# Altium footprint library 2.11-TQFP封装.PcbLib: 71 footprints (part 5 of 5)
Each footprint in its own frame and in the unit in brackets; x right, y up, seen from the top. Pads: shape width x height; smd on the part's side, far side on the other; paste and mask are expansions set on the pad; w line width, h text height; cw(c..) or ccw(c..) is an arc to the next point about the centre after c.
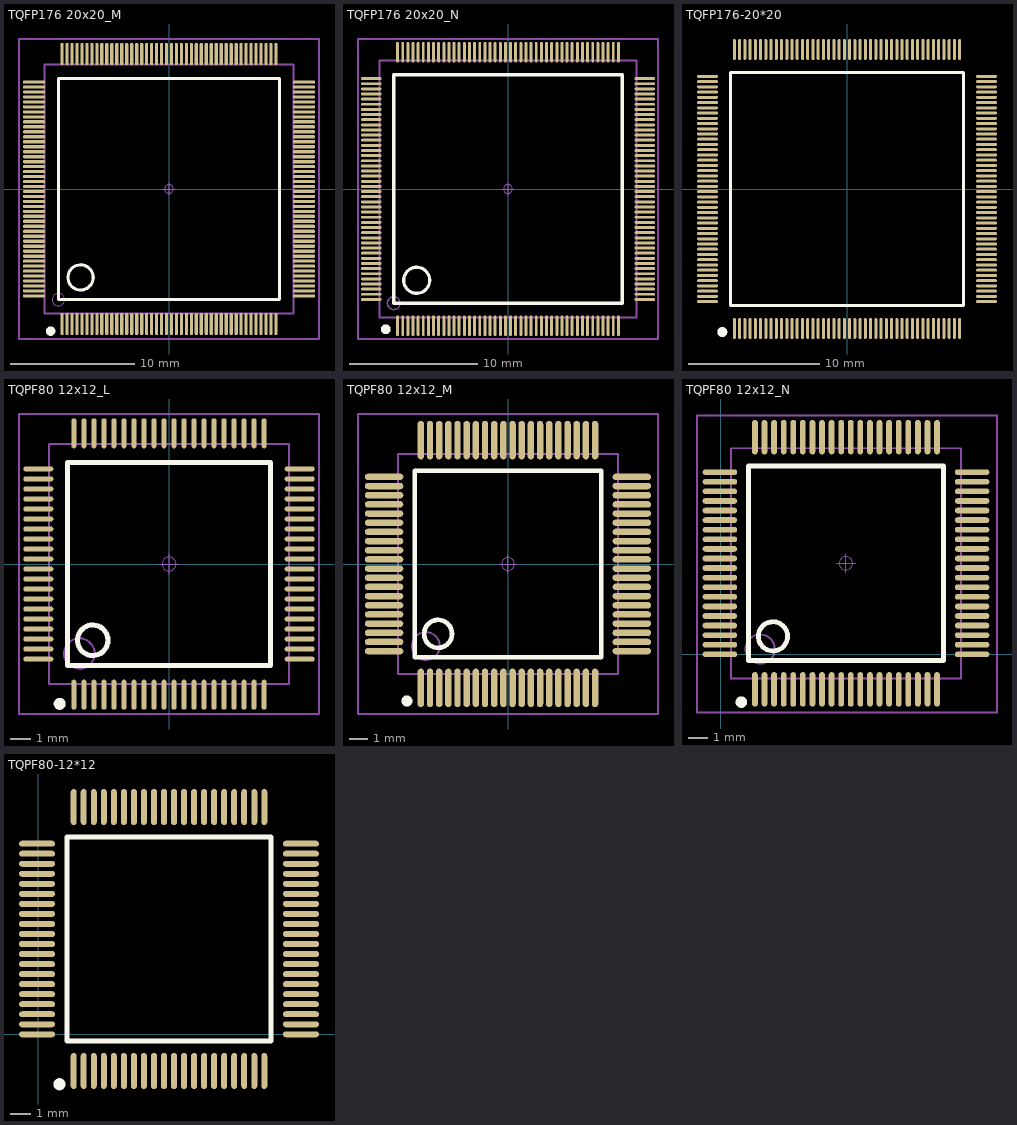
[diagram p4: the footprints below, top view; thin cyan lines are the x and y axes]

## TQFP176 20x20_M [mm] "176脚，体宽：20x20mm, 脚距：0.4mm 淘宝ID:黄晶宝石"
height 1.6
pads (176):
  oval 0.26x1.8 smd: 1(-8.6,-10.857) 2(-8.2,-10.857) 3(-7.8,-10.857) 4(-7.4,-10.857) 5(-7,-10.857) 6(-6.6,-10.857) 7(-6.2,-10.857) 8(-5.8,-10.857) 9(-5.4,-10.857) 10(-5,-10.857) 11(-4.6,-10.857) 12(-4.2,-10.857) 13(-3.8,-10.857) 14(-3.4,-10.857) 15(-3,-10.857) 16(-2.6,-10.857) 17(-2.2,-10.857) 18(-1.8,-10.857) 19(-1.4,-10.857) 20(-1,-10.857) 21(-0.6,-10.857) 22(-0.2,-10.857) 23(0.2,-10.857) 24(0.6,-10.857) 25(1,-10.857) 26(1.4,-10.857) 27(1.8,-10.857) 28(2.2,-10.857) 29(2.6,-10.857) 30(3,-10.857) 31(3.4,-10.857) 32(3.8,-10.857) 33(4.2,-10.857) 34(4.6,-10.857) 35(5,-10.857) 36(5.4,-10.857) 37(5.8,-10.857) 38(6.2,-10.857) 39(6.6,-10.857) 40(7,-10.857) 41(7.4,-10.857) 42(7.8,-10.857) 43(8.2,-10.857) 44(8.6,-10.857) 89(8.6,10.857) 90(8.2,10.857) 91(7.8,10.857) 92(7.4,10.857) 93(7,10.857) 94(6.6,10.857) 95(6.2,10.857) 96(5.8,10.857) 97(5.4,10.857) 98(5,10.857) 99(4.6,10.857) 100(4.2,10.857) 101(3.8,10.857) 102(3.4,10.857) 103(3,10.857) 104(2.6,10.857) 105(2.2,10.857) 106(1.8,10.857) 107(1.4,10.857) 108(1,10.857) 109(0.6,10.857) 110(0.2,10.857) 111(-0.2,10.857) 112(-0.6,10.857) 113(-1,10.857) 114(-1.4,10.857) 115(-1.8,10.857) 116(-2.2,10.857) 117(-2.6,10.857) 118(-3,10.857) 119(-3.4,10.857) 120(-3.8,10.857) 121(-4.2,10.857) 122(-4.6,10.857) 123(-5,10.857) 124(-5.4,10.857) 125(-5.8,10.857) 126(-6.2,10.857) 127(-6.6,10.857) 128(-7,10.857) 129(-7.4,10.857) 130(-7.8,10.857) 131(-8.2,10.857) 132(-8.6,10.857)
  oval 1.8x0.26 smd: 45(10.857,-8.6) 46(10.857,-8.2) 47(10.857,-7.8) 48(10.857,-7.4) 49(10.857,-7) 50(10.857,-6.6) 51(10.857,-6.2) 52(10.857,-5.8) 53(10.857,-5.4) 54(10.857,-5) 55(10.857,-4.6) 56(10.857,-4.2) 57(10.857,-3.8) 58(10.857,-3.4) 59(10.857,-3) 60(10.857,-2.6) 61(10.857,-2.2) 62(10.857,-1.8) 63(10.857,-1.4) 64(10.857,-1) 65(10.857,-0.6) 66(10.857,-0.2) 67(10.857,0.2) 68(10.857,0.6) 69(10.857,1) 70(10.857,1.4) 71(10.857,1.8) 72(10.857,2.2) 73(10.857,2.6) 74(10.857,3) 75(10.857,3.4) 76(10.857,3.8) 77(10.857,4.2) 78(10.857,4.6) 79(10.857,5) 80(10.857,5.4) 81(10.857,5.8) 82(10.857,6.2) 83(10.857,6.6) 84(10.857,7) 85(10.857,7.4) 86(10.857,7.8) 87(10.857,8.2) 88(10.857,8.6) 133(-10.857,8.6) 134(-10.857,8.2) 135(-10.857,7.8) 136(-10.857,7.4) 137(-10.857,7) 138(-10.857,6.6) 139(-10.857,6.2) 140(-10.857,5.8) 141(-10.857,5.4) 142(-10.857,5) 143(-10.857,4.6) 144(-10.857,4.2) 145(-10.857,3.8) 146(-10.857,3.4) 147(-10.857,3) 148(-10.857,2.6) 149(-10.857,2.2) 150(-10.857,1.8) 151(-10.857,1.4) 152(-10.857,1) 153(-10.857,0.6) 154(-10.857,0.2) 155(-10.857,-0.2) 156(-10.857,-0.6) 157(-10.857,-1) 158(-10.857,-1.4) 159(-10.857,-1.8) 160(-10.857,-2.2) 161(-10.857,-2.6) 162(-10.857,-3) 163(-10.857,-3.4) 164(-10.857,-3.8) 165(-10.857,-4.2) 166(-10.857,-4.6) 167(-10.857,-5) 168(-10.857,-5.4) 169(-10.857,-5.8) 170(-10.857,-6.2) 171(-10.857,-6.6) 172(-10.857,-7) 173(-10.857,-7.4) 174(-10.857,-7.8) 175(-10.857,-8.2) 176(-10.857,-8.6)
Top Overlay:
  circle w0.254: c-7.112,-7.112 r1.016
  circle w0.508: c-9.525,-11.43 r0.127
  lines w0.254: -8.89,-8.89 8.89,-8.89 8.89,8.89 -8.89,8.89 -8.89,-8.89
Mechanical 13:
  circle w0.1: c-8.894,-8.894 r0.5
  lines w0.15: -10,-10 -10,10 10,10 10,-10 -10,-10
Mechanical 15:
  circle w0.05: c0,0 r0.35
  lines w0.05: -0.5,0 0.5,0 ; 0,-0.5 0,0.5
  lines w0.15: -12.065,-12.065 12.065,-12.065 12.065,12.065 -12.065,12.065 -12.065,-12.065
3D body "TQFP176 20x20.STEP": height 1.05, standoff -0.01, extent -11.002,-11.002 11.002,11.002

## TQFP176 20x20_N [mm] "176脚，体宽：20x20mm, 脚距：0.4mm"
height 1.6
pads (176):
  oval 0.23x1.6 smd: 1(-8.6,-10.654) 2(-8.2,-10.654) 3(-7.8,-10.654) 4(-7.4,-10.654) 5(-7,-10.654) 6(-6.6,-10.654) 7(-6.2,-10.654) 8(-5.8,-10.654) 9(-5.4,-10.654) 10(-5,-10.654) 11(-4.6,-10.654) 12(-4.2,-10.654) 13(-3.8,-10.654) 14(-3.4,-10.654) 15(-3,-10.654) 16(-2.6,-10.654) 17(-2.2,-10.654) 18(-1.8,-10.654) 19(-1.4,-10.654) 20(-1,-10.654) 21(-0.6,-10.654) 22(-0.2,-10.654) 23(0.2,-10.654) 24(0.6,-10.654) 25(1,-10.654) 26(1.4,-10.654) 27(1.8,-10.654) 28(2.2,-10.654) 29(2.6,-10.654) 30(3,-10.654) 31(3.4,-10.654) 32(3.8,-10.654) 33(4.2,-10.654) 34(4.6,-10.654) 35(5,-10.654) 36(5.4,-10.654) 37(5.8,-10.654) 38(6.2,-10.654) 39(6.6,-10.654) 40(7,-10.654) 41(7.4,-10.654) 42(7.8,-10.654) 43(8.2,-10.654) 44(8.6,-10.654) 89(8.6,10.654) 90(8.2,10.654) 91(7.8,10.654) 92(7.4,10.654) 93(7,10.654) 94(6.6,10.654) 95(6.2,10.654) 96(5.8,10.654) 97(5.4,10.654) 98(5,10.654) 99(4.6,10.654) 100(4.2,10.654) 101(3.8,10.654) 102(3.4,10.654) 103(3,10.654) 104(2.6,10.654) 105(2.2,10.654) 106(1.8,10.654) 107(1.4,10.654) 108(1,10.654) 109(0.6,10.654) 110(0.2,10.654) 111(-0.2,10.654) 112(-0.6,10.654) 113(-1,10.654) 114(-1.4,10.654) 115(-1.8,10.654) 116(-2.2,10.654) 117(-2.6,10.654) 118(-3,10.654) 119(-3.4,10.654) 120(-3.8,10.654) 121(-4.2,10.654) 122(-4.6,10.654) 123(-5,10.654) 124(-5.4,10.654) 125(-5.8,10.654) 126(-6.2,10.654) 127(-6.6,10.654) 128(-7,10.654) 129(-7.4,10.654) 130(-7.8,10.654) 131(-8.2,10.654) 132(-8.6,10.654)
  oval 1.6x0.23 smd: 45(10.654,-8.6) 46(10.654,-8.2) 47(10.654,-7.8) 48(10.654,-7.4) 49(10.654,-7) 50(10.654,-6.6) 51(10.654,-6.2) 52(10.654,-5.8) 53(10.654,-5.4) 54(10.654,-5) 55(10.654,-4.6) 56(10.654,-4.2) 57(10.654,-3.8) 58(10.654,-3.4) 59(10.654,-3) 60(10.654,-2.6) 61(10.654,-2.2) 62(10.654,-1.8) 63(10.654,-1.4) 64(10.654,-1) 65(10.654,-0.6) 66(10.654,-0.2) 67(10.654,0.2) 68(10.654,0.6) 69(10.654,1) 70(10.654,1.4) 71(10.654,1.8) 72(10.654,2.2) 73(10.654,2.6) 74(10.654,3) 75(10.654,3.4) 76(10.654,3.8) 77(10.654,4.2) 78(10.654,4.6) 79(10.654,5) 80(10.654,5.4) 81(10.654,5.8) 82(10.654,6.2) 83(10.654,6.6) 84(10.654,7) 85(10.654,7.4) 86(10.654,7.8) 87(10.654,8.2) 88(10.654,8.6) 133(-10.654,8.6) 134(-10.654,8.2) 135(-10.654,7.8) 136(-10.654,7.4) 137(-10.654,7) 138(-10.654,6.6) 139(-10.654,6.2) 140(-10.654,5.8) 141(-10.654,5.4) 142(-10.654,5) 143(-10.654,4.6) 144(-10.654,4.2) 145(-10.654,3.8) 146(-10.654,3.4) 147(-10.654,3) 148(-10.654,2.6) 149(-10.654,2.2) 150(-10.654,1.8) 151(-10.654,1.4) 152(-10.654,1) 153(-10.654,0.6) 154(-10.654,0.2) 155(-10.654,-0.2) 156(-10.654,-0.6) 157(-10.654,-1) 158(-10.654,-1.4) 159(-10.654,-1.8) 160(-10.654,-2.2) 161(-10.654,-2.6) 162(-10.654,-3) 163(-10.654,-3.4) 164(-10.654,-3.8) 165(-10.654,-4.2) 166(-10.654,-4.6) 167(-10.654,-5) 168(-10.654,-5.4) 169(-10.654,-5.8) 170(-10.654,-6.2) 171(-10.654,-6.6) 172(-10.654,-7) 173(-10.654,-7.4) 174(-10.654,-7.8) 175(-10.654,-8.2) 176(-10.654,-8.6)
Top Overlay:
  circle w0.508: c-9.525,-10.922 r0.127
  circle w0.254: c-7.112,-7.112 r1.016
  lines w0.254: -8.89,-8.89 8.89,-8.89 8.89,8.89 -8.89,8.89 -8.89,-8.89
Mechanical 13:
  circle w0.1: c-8.894,-8.894 r0.5
  lines w0.15: -10,-10 -10,10 10,10 10,-10 -10,-10
Mechanical 15:
  circle w0.05: c0,0 r0.35
  lines w0.05: -0.5,0 0.5,0 ; 0,-0.5 0,0.5
  lines w0.15: -11.684,-11.684 11.684,-11.684 11.684,11.684 -11.684,11.684 -11.684,-11.684
3D body "TQFP176 20x20.STEP": height 1.05, standoff -0.01, extent -11.002,-11.002 11.002,11.002

## TQFP176-20*20 [mm] "20x20mm, 0.4mm     封装库来自淘宝卖家 ID：黄晶宝石"
pads (176):
  oval 0.23x1.6 smd: 1(-8.6,-10.654) 2(-8.2,-10.654) 3(-7.8,-10.654) 4(-7.4,-10.654) 5(-7,-10.654) 6(-6.6,-10.654) 7(-6.2,-10.654) 8(-5.8,-10.654) 9(-5.4,-10.654) 10(-5,-10.654) 11(-4.6,-10.654) 12(-4.2,-10.654) 13(-3.8,-10.654) 14(-3.4,-10.654) 15(-3,-10.654) 16(-2.6,-10.654) 17(-2.2,-10.654) 18(-1.8,-10.654) 19(-1.4,-10.654) 20(-1,-10.654) 21(-0.6,-10.654) 22(-0.2,-10.654) 23(0.2,-10.654) 24(0.6,-10.654) 25(1,-10.654) 26(1.4,-10.654) 27(1.8,-10.654) 28(2.2,-10.654) 29(2.6,-10.654) 30(3,-10.654) 31(3.4,-10.654) 32(3.8,-10.654) 33(4.2,-10.654) 34(4.6,-10.654) 35(5,-10.654) 36(5.4,-10.654) 37(5.8,-10.654) 38(6.2,-10.654) 39(6.6,-10.654) 40(7,-10.654) 41(7.4,-10.654) 42(7.8,-10.654) 43(8.2,-10.654) 44(8.6,-10.654) 89(8.6,10.654) 90(8.2,10.654) 91(7.8,10.654) 92(7.4,10.654) 93(7,10.654) 94(6.6,10.654) 95(6.2,10.654) 96(5.8,10.654) 97(5.4,10.654) 98(5,10.654) 99(4.6,10.654) 100(4.2,10.654) 101(3.8,10.654) 102(3.4,10.654) 103(3,10.654) 104(2.6,10.654) 105(2.2,10.654) 106(1.8,10.654) 107(1.4,10.654) 108(1,10.654) 109(0.6,10.654) 110(0.2,10.654) 111(-0.2,10.654) 112(-0.6,10.654) 113(-1,10.654) 114(-1.4,10.654) 115(-1.8,10.654) 116(-2.2,10.654) 117(-2.6,10.654) 118(-3,10.654) 119(-3.4,10.654) 120(-3.8,10.654) 121(-4.2,10.654) 122(-4.6,10.654) 123(-5,10.654) 124(-5.4,10.654) 125(-5.8,10.654) 126(-6.2,10.654) 127(-6.6,10.654) 128(-7,10.654) 129(-7.4,10.654) 130(-7.8,10.654) 131(-8.2,10.654) 132(-8.6,10.654)
  oval 1.6x0.23 smd: 45(10.654,-8.6) 46(10.654,-8.2) 47(10.654,-7.8) 48(10.654,-7.4) 49(10.654,-7) 50(10.654,-6.6) 51(10.654,-6.2) 52(10.654,-5.8) 53(10.654,-5.4) 54(10.654,-5) 55(10.654,-4.6) 56(10.654,-4.2) 57(10.654,-3.8) 58(10.654,-3.4) 59(10.654,-3) 60(10.654,-2.6) 61(10.654,-2.2) 62(10.654,-1.8) 63(10.654,-1.4) 64(10.654,-1) 65(10.654,-0.6) 66(10.654,-0.2) 67(10.654,0.2) 68(10.654,0.6) 69(10.654,1) 70(10.654,1.4) 71(10.654,1.8) 72(10.654,2.2) 73(10.654,2.6) 74(10.654,3) 75(10.654,3.4) 76(10.654,3.8) 77(10.654,4.2) 78(10.654,4.6) 79(10.654,5) 80(10.654,5.4) 81(10.654,5.8) 82(10.654,6.2) 83(10.654,6.6) 84(10.654,7) 85(10.654,7.4) 86(10.654,7.8) 87(10.654,8.2) 88(10.654,8.6) 133(-10.654,8.6) 134(-10.654,8.2) 135(-10.654,7.8) 136(-10.654,7.4) 137(-10.654,7) 138(-10.654,6.6) 139(-10.654,6.2) 140(-10.654,5.8) 141(-10.654,5.4) 142(-10.654,5) 143(-10.654,4.6) 144(-10.654,4.2) 145(-10.654,3.8) 146(-10.654,3.4) 147(-10.654,3) 148(-10.654,2.6) 149(-10.654,2.2) 150(-10.654,1.8) 151(-10.654,1.4) 152(-10.654,1) 153(-10.654,0.6) 154(-10.654,0.2) 155(-10.654,-0.2) 156(-10.654,-0.6) 157(-10.654,-1) 158(-10.654,-1.4) 159(-10.654,-1.8) 160(-10.654,-2.2) 161(-10.654,-2.6) 162(-10.654,-3) 163(-10.654,-3.4) 164(-10.654,-3.8) 165(-10.654,-4.2) 166(-10.654,-4.6) 167(-10.654,-5) 168(-10.654,-5.4) 169(-10.654,-5.8) 170(-10.654,-6.2) 171(-10.654,-6.6) 172(-10.654,-7) 173(-10.654,-7.4) 174(-10.654,-7.8) 175(-10.654,-8.2) 176(-10.654,-8.6)
Top Overlay:
  circle w0.508: c-9.525,-10.922 r0.127
  lines w0.254: -8.89,-8.89 8.89,-8.89 8.89,8.89 -8.89,8.89 -8.89,-8.89
3D body "TQFP176_20x20.STEP": height 1.05, standoff 0, extent -11.002,-11.002 11.002,11.002

## TQPF80 12x12_L [mm] "80脚，体宽：12x12mm, 脚距：0.5mm           淘宝ID:黄晶宝石"
pads (80):
  oval 0.25x1.5 smd: 1(-4.75,-6.525) 2(-4.25,-6.525) 3(-3.75,-6.525) 4(-3.25,-6.525) 5(-2.75,-6.525) 6(-2.25,-6.525) 7(-1.75,-6.525) 8(-1.25,-6.525) 9(-0.75,-6.525) 10(-0.25,-6.525) 11(0.25,-6.525) 12(0.75,-6.525) 13(1.25,-6.525) 14(1.75,-6.525) 15(2.25,-6.525) 16(2.75,-6.525) 17(3.25,-6.525) 18(3.75,-6.525) 19(4.25,-6.525) 20(4.75,-6.525) 41(4.75,6.525) 42(4.25,6.525) 43(3.75,6.525) 44(3.25,6.525) 45(2.75,6.525) 46(2.25,6.525) 47(1.75,6.525) 48(1.25,6.525) 49(0.75,6.525) 50(0.25,6.525) 51(-0.25,6.525) 52(-0.75,6.525) 53(-1.25,6.525) 54(-1.75,6.525) 55(-2.25,6.525) 56(-2.75,6.525) 57(-3.25,6.525) 58(-3.75,6.525) 59(-4.25,6.525) 60(-4.75,6.525)
  oval 1.5x0.25 smd: 21(6.525,-4.75) 22(6.525,-4.25) 23(6.525,-3.75) 24(6.525,-3.25) 25(6.525,-2.75) 26(6.525,-2.25) 27(6.525,-1.75) 28(6.525,-1.25) 29(6.525,-0.75) 30(6.525,-0.25) 31(6.525,0.25) 32(6.525,0.75) 33(6.525,1.25) 34(6.525,1.75) 35(6.525,2.25) 36(6.525,2.75) 37(6.525,3.25) 38(6.525,3.75) 39(6.525,4.25) 40(6.525,4.75) 61(-6.525,4.75) 62(-6.525,4.25) 63(-6.525,3.75) 64(-6.525,3.25) 65(-6.525,2.75) 66(-6.525,2.25) 67(-6.525,1.75) 68(-6.525,1.25) 69(-6.525,0.75) 70(-6.525,0.25) 71(-6.525,-0.25) 72(-6.525,-0.75) 73(-6.525,-1.25) 74(-6.525,-1.75) 75(-6.525,-2.25) 76(-6.525,-2.75) 77(-6.525,-3.25) 78(-6.525,-3.75) 79(-6.525,-4.25) 80(-6.525,-4.75)
Top Overlay:
  circle w0.254: c-3.81,-3.81 r0.762
  circle w0.35: c-5.461,-6.985 r0.125
  lines w0.254: -5.08,-5.08 -5.08,5.08 5.08,5.08 5.08,-5.08 -5.08,-5.08
Mechanical 13:
  circle w0.1: c-4.476,-4.476 r0.762
  lines w0.1: -6,-6 -6,6 6,6 6,-6 -6,-6
Mechanical 15:
  circle w0.05: c0,0 r0.35
  lines w0.05: -0.5,0 0.5,0 ; 0,-0.5 0,0.5
  lines w0.1: -7.493,-7.493 -7.493,7.493 7.493,7.493 7.493,-7.493 -7.493,-7.493
3D body "TQFP80 12x12.STEP": height 1.05, standoff -0.01, extent -7.002,-7.002 7.002,7.002

## TQPF80 12x12_M [mm] "80脚，体宽：12x12mm, 脚距：0.5mm          淘宝ID:黄晶宝石"
pads (80):
  oval 0.35x2.1 smd: 1(-4.752,-6.754) 2(-4.252,-6.754) 3(-3.752,-6.754) 4(-3.252,-6.754) 5(-2.752,-6.754) 6(-2.252,-6.754) 7(-1.752,-6.754) 8(-1.252,-6.754) 9(-0.752,-6.754) 10(-0.252,-6.754) 11(0.248,-6.754) 12(0.748,-6.754) 13(1.248,-6.754) 14(1.748,-6.754) 15(2.248,-6.754) 16(2.748,-6.754) 17(3.248,-6.754) 18(3.748,-6.754) 19(4.248,-6.754) 20(4.748,-6.754) 41(4.748,6.754) 42(4.248,6.754) 43(3.748,6.754) 44(3.248,6.754) 45(2.748,6.754) 46(2.248,6.754) 47(1.748,6.754) 48(1.248,6.754) 49(0.748,6.754) 50(0.248,6.754) 51(-0.252,6.754) 52(-0.752,6.754) 53(-1.252,6.754) 54(-1.752,6.754) 55(-2.252,6.754) 56(-2.752,6.754) 57(-3.252,6.754) 58(-3.752,6.754) 59(-4.252,6.754) 60(-4.752,6.754)
  oval 2.1x0.35 smd: 21(6.752,-4.75) 22(6.752,-4.25) 23(6.752,-3.75) 24(6.752,-3.25) 25(6.752,-2.75) 26(6.752,-2.25) 27(6.752,-1.75) 28(6.752,-1.25) 29(6.752,-0.75) 30(6.752,-0.25) 31(6.752,0.25) 32(6.752,0.75) 33(6.752,1.25) 34(6.752,1.75) 35(6.752,2.25) 36(6.752,2.75) 37(6.752,3.25) 38(6.752,3.75) 39(6.752,4.25) 40(6.752,4.75) 61(-6.756,4.75) 62(-6.756,4.25) 63(-6.756,3.75) 64(-6.756,3.25) 65(-6.756,2.75) 66(-6.756,2.25) 67(-6.756,1.75) 68(-6.756,1.25) 69(-6.756,0.75) 70(-6.756,0.25) 71(-6.756,-0.25) 72(-6.756,-0.75) 73(-6.756,-1.25) 74(-6.756,-1.75) 75(-6.756,-2.25) 76(-6.756,-2.75) 77(-6.756,-3.25) 78(-6.756,-3.75) 79(-6.756,-4.25) 80(-6.756,-4.75)
Top Overlay:
  circle w0.35: c-5.512,-7.468 r0.125
  circle w0.254: c-3.812,-3.81 r0.762
  lines w0.254: -5.082,-5.08 5.078,-5.08 5.078,5.08 -5.082,5.08 -5.082,-5.08
Mechanical 13:
  circle w0.1: c-4.478,-4.476 r0.762
  lines w0.1: -6.002,-6 5.998,-6 5.998,6 -6.002,6 -6.002,-6
Mechanical 15:
  circle w0.05: c-0.002,0 r0.35
  lines w0.05: -0.502,0 0.498,0 ; -0.002,-0.5 -0.002,0.5
  lines w0.1: -8.179,-8.179 8.179,-8.179 8.179,8.179 -8.179,8.179 -8.179,-8.179
3D body "TQFP80 12x12.STEP": height 1.05, standoff -0.01, extent -7.005,-7.002 7,7.002

## TQPF80 12x12_N [mm] "80脚，体宽：12x12mm, 脚距：0.5mm          淘宝ID:黄晶宝石"
pads (80):
  oval 0.3x1.8 smd: 1(1.775,-1.826) 2(2.275,-1.826) 3(2.775,-1.826) 4(3.275,-1.826) 5(3.775,-1.826) 6(4.275,-1.826) 7(4.775,-1.826) 8(5.275,-1.826) 9(5.775,-1.826) 10(6.275,-1.826) 11(6.775,-1.826) 12(7.275,-1.826) 13(7.775,-1.826) 14(8.275,-1.826) 15(8.775,-1.826) 16(9.275,-1.826) 17(9.775,-1.826) 18(10.275,-1.826) 19(10.775,-1.826) 20(11.275,-1.826) 41(11.275,11.326) 42(10.775,11.326) 43(10.275,11.326) 44(9.775,11.326) 45(9.275,11.326) 46(8.775,11.326) 47(8.275,11.326) 48(7.775,11.326) 49(7.275,11.326) 50(6.775,11.326) 51(6.275,11.326) 52(5.775,11.326) 53(5.275,11.326) 54(4.775,11.326) 55(4.275,11.326) 56(3.775,11.326) 57(3.275,11.326) 58(2.775,11.326) 59(2.275,11.326) 60(1.775,11.326)
  oval 1.8x0.3 smd: 21(13.102,0) 22(13.102,0.5) 23(13.102,1) 24(13.102,1.5) 25(13.102,2) 26(13.102,2.5) 27(13.102,3) 28(13.102,3.5) 29(13.102,4) 30(13.102,4.5) 31(13.102,5) 32(13.102,5.5) 33(13.102,6) 34(13.102,6.5) 35(13.102,7) 36(13.102,7.5) 37(13.102,8) 38(13.102,8.5) 39(13.102,9) 40(13.102,9.5) 61(-0.051,9.5) 62(-0.051,9) 63(-0.051,8.5) 64(-0.051,8) 65(-0.051,7.5) 66(-0.051,7) 67(-0.051,6.5) 68(-0.051,6) 69(-0.051,5.5) 70(-0.051,5) 71(-0.051,4.5) 72(-0.051,4) 73(-0.051,3.5) 74(-0.051,3) 75(-0.051,2.5) 76(-0.051,2) 77(-0.051,1.5) 78(-0.051,1) 79(-0.051,0.5) 80(-0.051,0)
Top Overlay:
  circle w0.35: c1.067,-2.489 r0.125
  circle w0.254: c2.715,0.94 r0.762
  lines w0.254: 1.445,-0.33 11.605,-0.33 11.605,9.83 1.445,9.83 1.445,-0.33
Mechanical 13:
  circle w0.1: c2.049,0.274 r0.762
  lines w0.1: 0.525,-1.25 12.525,-1.25 12.525,10.75 0.525,10.75 0.525,-1.25
Mechanical 15:
  circle w0.05: c6.525,4.75 r0.35
  lines w0.05: 6.025,4.75 7.025,4.75 ; 6.525,4.25 6.525,5.25
  lines w0.1: -1.245,-3.023 14.402,-3.023 14.402,12.446 -1.245,12.446 -1.245,-3.023
3D body "TQFP80 12x12.STEP": height 1.05, standoff -0.01, extent -0.477,-2.252 13.527,11.752

## TQPF80-12*12 [mm] "12x12mm, 0.5mm      封装库来自淘宝卖家 ID：黄晶宝石"
pads (80):
  oval 0.3x1.8 smd: 1(1.775,-1.826) 2(2.275,-1.826) 3(2.775,-1.826) 4(3.275,-1.826) 5(3.775,-1.826) 6(4.275,-1.826) 7(4.775,-1.826) 8(5.275,-1.826) 9(5.775,-1.826) 10(6.275,-1.826) 11(6.775,-1.826) 12(7.275,-1.826) 13(7.775,-1.826) 14(8.275,-1.826) 15(8.775,-1.826) 16(9.275,-1.826) 17(9.775,-1.826) 18(10.275,-1.826) 19(10.775,-1.826) 20(11.275,-1.826) 41(11.275,11.326) 42(10.775,11.326) 43(10.275,11.326) 44(9.775,11.326) 45(9.275,11.326) 46(8.775,11.326) 47(8.275,11.326) 48(7.775,11.326) 49(7.275,11.326) 50(6.775,11.326) 51(6.275,11.326) 52(5.775,11.326) 53(5.275,11.326) 54(4.775,11.326) 55(4.275,11.326) 56(3.775,11.326) 57(3.275,11.326) 58(2.775,11.326) 59(2.275,11.326) 60(1.775,11.326)
  oval 1.8x0.3 smd: 21(13.102,0) 22(13.102,0.5) 23(13.102,1) 24(13.102,1.5) 25(13.102,2) 26(13.102,2.5) 27(13.102,3) 28(13.102,3.5) 29(13.102,4) 30(13.102,4.5) 31(13.102,5) 32(13.102,5.5) 33(13.102,6) 34(13.102,6.5) 35(13.102,7) 36(13.102,7.5) 37(13.102,8) 38(13.102,8.5) 39(13.102,9) 40(13.102,9.5) 61(-0.051,9.5) 62(-0.051,9) 63(-0.051,8.5) 64(-0.051,8) 65(-0.051,7.5) 66(-0.051,7) 67(-0.051,6.5) 68(-0.051,6) 69(-0.051,5.5) 70(-0.051,5) 71(-0.051,4.5) 72(-0.051,4) 73(-0.051,3.5) 74(-0.051,3) 75(-0.051,2.5) 76(-0.051,2) 77(-0.051,1.5) 78(-0.051,1) 79(-0.051,0.5) 80(-0.051,0)
Top Overlay:
  circle w0.35: c1.067,-2.489 r0.125
  lines w0.254: 1.445,-0.33 1.445,9.83 11.605,9.83 11.605,-0.33 1.445,-0.33
3D body "TQFP80_12x12.STEP": height 1.05, standoff 0, extent -0.483,-2.235 13.522,11.769